# Altium footprint library PcbLib1_Symbols.PcbLib: 3 footprints
Each footprint in its own frame and in the unit in brackets; x right, y up, seen from the top. Pads: shape width x height; smd on the part's side, far side on the other; paste and mask are expansions set on the pad; w line width, h text height; cw(c..) or ccw(c..) is an arc to the next point about the centre after c.
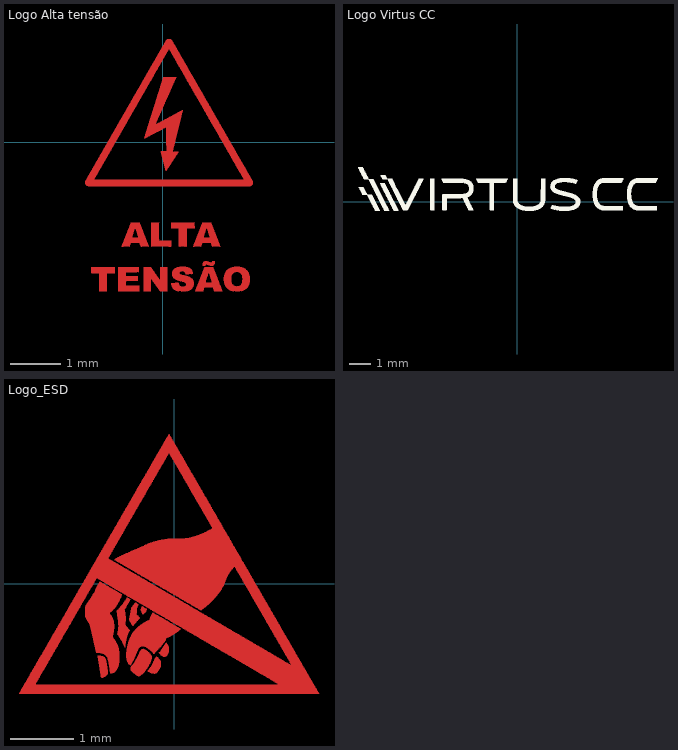
[diagram p0: the footprints below, top view; thin cyan lines are the x and y axes]

## Logo Alta tensão [mm]
Top Layer:
  drawing of 14 lines, arcs and shapes, not listed

## Logo Virtus CC [mm]
Top Overlay:
  drawing of 14 lines, arcs and shapes, not listed

## Logo_ESD [mm]
Top Layer:
  drawing of 10 lines, arcs and shapes, not listed